# Altium footprint library DIM.PcbLib: 183 footprints (part 6 of 12)
Each footprint in its own frame and in the unit in brackets; x right, y up, seen from the top. Pads: shape width x height; smd on the part's side, far side on the other; paste and mask are expansions set on the pad; w line width, h text height; cw(c..) or ccw(c..) is an arc to the next point about the centre after c.
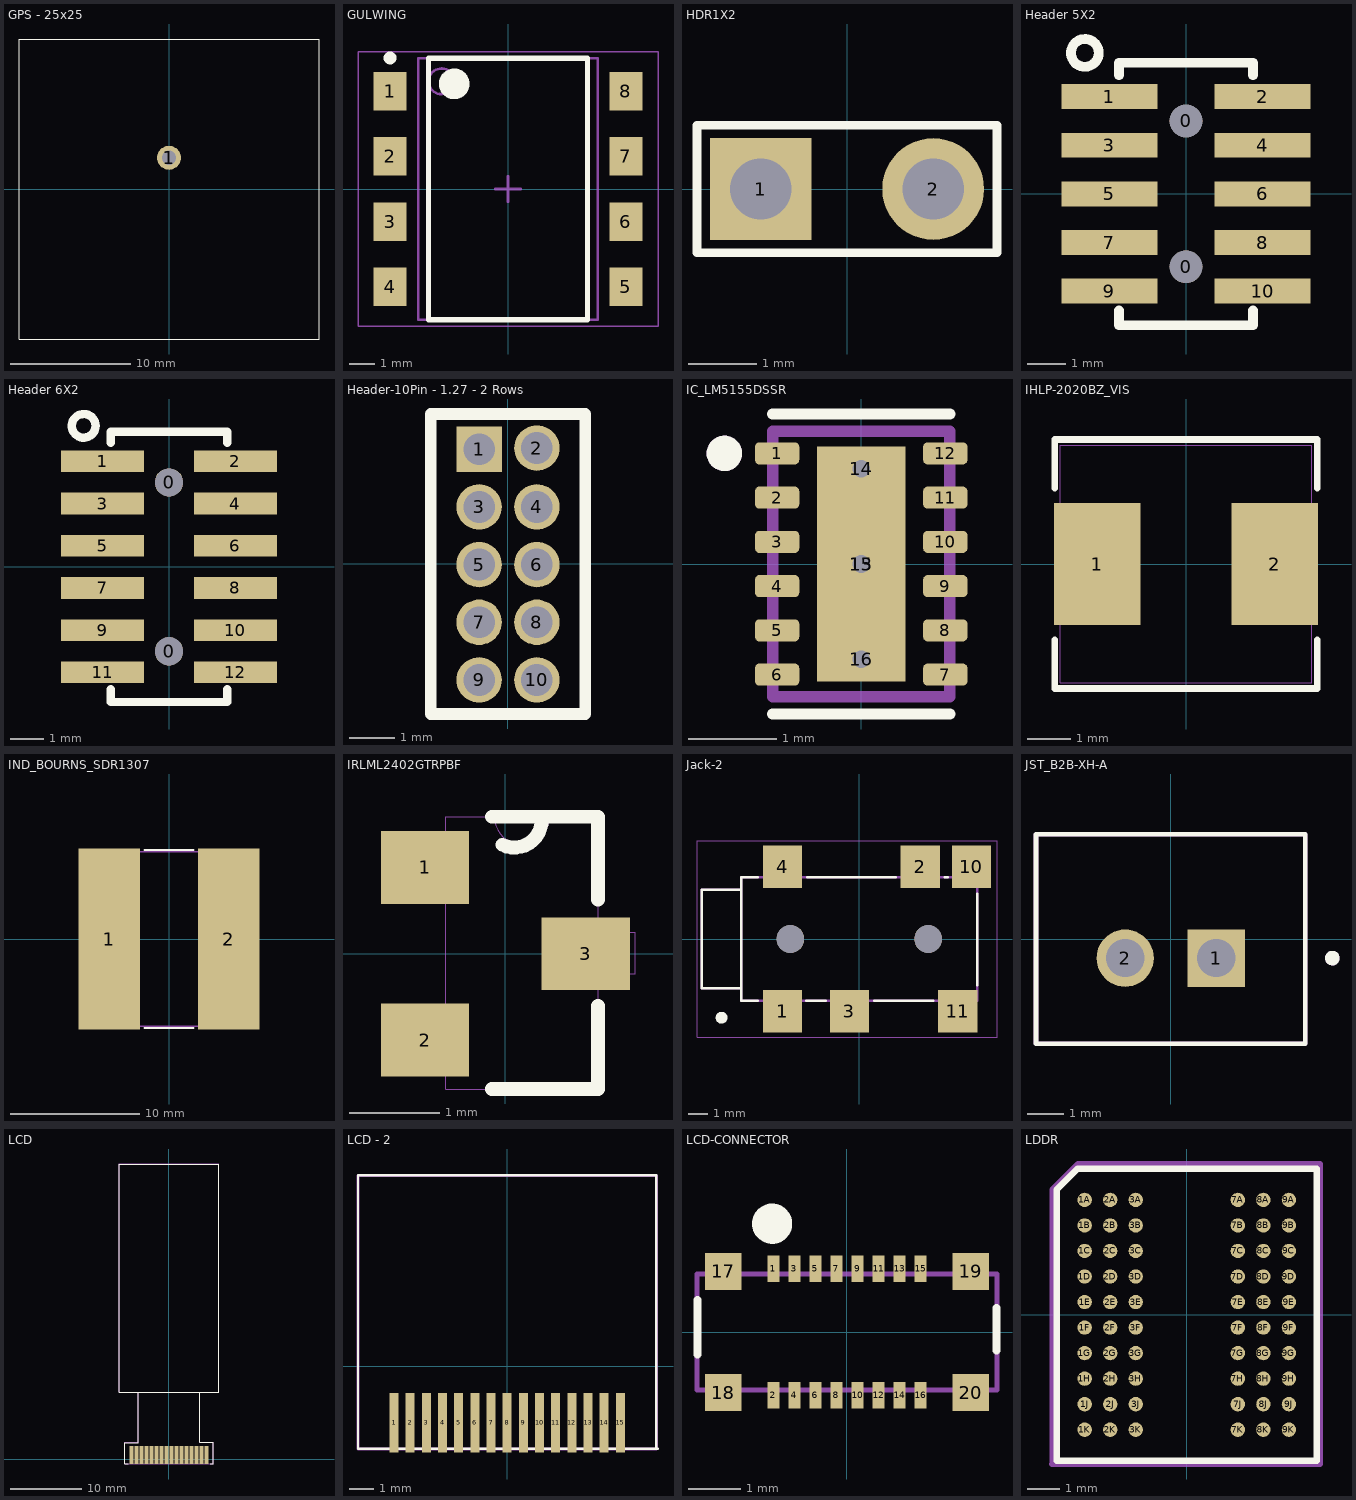
[diagram p5: the footprints below, top view; thin cyan lines are the x and y axes]

## GPS - 25x25 [mm]
pads (1):
  round 2 hole 1.2: 1(0,2.6)
Top Overlay:
  lines w0.1: -12.5,-12.5 -12.5,12.5 12.5,12.5 12.5,-12.5 -12.5,-12.5
3D body: height 2, standoff 0, extent -12.5,-12.5 12.5,12.5

## GULWING [mm]
height 3.85
pads (8):
  rect 1.3x1.5 smd: 1(-4.6,3.81) 2(-4.6,1.27) 3(-4.6,-1.27) 4(-4.6,-3.81) 5(4.6,-3.81) 6(4.6,-1.27) 7(4.6,1.27) 8(4.6,3.81)
Top Overlay:
  circle w0.25: c-4.6,5.11 r0.125
  circle w0.6: c-2.1,4.1 r0.3
  lines w0.2: -3.1,-5.1 -3.1,5.1 3.1,5.1 3.1,-5.1 -3.1,-5.1
Mechanical 13:
  circle w0.1: c-2.6,4.2 r0.5
  lines w0.1: -3.5,-5.1 -3.5,5.1 3.5,5.1 3.5,-5.1 -3.5,-5.1
Mechanical 15:
  lines w0.05: -5.85,-5.35 -5.85,5.35 5.85,5.35 5.85,-5.35 -5.85,-5.35
  lines w0.1: -0.5,0 0.5,0 ; 0,-0.5 0,0.5
3D body: height 3.85, standoff 0.1, extent -3.5,-5.1 3.5,5.1

## HDR1X2 [mm] "Connector; Header; 2 Position"
pads (2):
  rect 1.5x1.5 hole 0.9: 1(-1.27,0)
  round 1.5 hole 0.9: 2(1.27,0)
Top Overlay:
  lines w0.127: -2.21,-0.94 2.21,-0.94 2.21,0.94 -2.21,0.94 -2.21,-0.94

## Header 5X2 [mm]
pads (12):
  round 0.85 hole 0.85: 0(0,-1.905) 0(0,1.905)
  rect 2.5x0.65 smd: 1(-2,2.54) 2(2,2.54) 3(-2,1.27) 4(2,1.27) 5(-2,0) 6(2,0) 7(-2,-1.27) 8(2,-1.27) 9(-2,-2.54) 10(2,-2.54)
Top Overlay:
  circle w0.254: c-2.642,3.683 r0.364
  lines w0.254: -1.75,-3.048 -1.75,-3.429 1.75,-3.429 1.75,-3.048 ; -1.75,3.099 -1.75,3.429 1.75,3.429 1.75,3.099

## Header 6X2 [mm]
pads (14):
  round 0.85 hole 0.85: 0(0,-2.54) 0(0,2.54)
  rect 2.5x0.65 smd: 1(-2,3.175) 2(2,3.175) 3(-2,1.905) 4(2,1.905) 5(-2,0.635) 6(2,0.635) 7(-2,-0.635) 8(2,-0.635) 9(-2,-1.905) 10(2,-1.905) 11(-2,-3.175) 12(2,-3.175)
Top Overlay:
  circle w0.254: c-2.565,4.242 r0.357
  lines w0.254: -1.75,-3.683 -1.75,-4.064 1.75,-4.064 1.75,-3.683 ; -1.75,3.734 -1.75,4.064 1.75,4.064 1.75,3.734

## Header-10Pin - 1.27 - 2 Rows [mm]
pads (10):
  rect 1x1 hole 0.7: 1(-0.635,2.527)
  round 1 hole 0.7: 2(0.635,2.553) 3(-0.635,1.257) 4(0.635,1.257) 5(-0.635,-0.013) 6(0.635,-0.013) 7(-0.635,-1.283) 8(0.635,-1.283) 9(-0.635,-2.553) 10(0.635,-2.553)
Top Overlay:
  lines w0.254: -1.7,-3.302 1.7,-3.302 1.7,3.302 -1.7,3.302 -1.7,-3.302

## IC_LM5155DSSR [mm]
height 0.8
pads (16):
  rrect40% 0.5x0.25 smd mask+0.05: 1(-0.95,1.25) 2(-0.95,0.75) 3(-0.95,0.25) 4(-0.95,-0.25) 5(-0.95,-0.75) 6(-0.95,-1.25) 7(0.95,-1.25) 8(0.95,-0.75) 9(0.95,-0.25) 10(0.95,0.25) 11(0.95,0.75) 12(0.95,1.25)
  rect 1x2.65 smd paste-2 mask+0.05: 13(0,0)
  round 0.4 hole 0.2 mask+0: 14(0,1.075) 15(0,0) 16(0,-1.075)
Top Overlay:
  circle w0.2: c-1.546,1.25 r0.1
  lines w0.127: -1,-1.695 1,-1.695 ; -1,1.695 1,1.695
Top Paste:
  region: 0.475,0.1 -0.475,0.1 -0.475,1.27 0.475,1.27
  region: 0.475,-1.27 -0.475,-1.27 -0.475,-0.1 0.475,-0.1
Mechanical 13:
  circle w0.2: c-1.546,1.25 r0.1
  lines w0.127: -1,-1.5 -1,1.5 1,1.5 1,-1.5 -1,-1.5
3D body "step_temp.STEP": height 0.8, standoff 0, extent -1,-1.5 1,1.5

## IHLP-2020BZ_VIS [mil]
pads (2):
  rect 78x110 smd paste+0: 1(-80,0) 2(80,0)
Top Overlay:
  lines w6: -118,-68.1 -118,-112 118,-112 118,-68.1 ; -118,68.1 -118,112 118,112 118,68.1
Mechanical 13:
  circle w0: c-93,0 r3
  lines w1: -113,-107 113,-107 113,107 -113,107 -113,-107
3D body "IND_IHLP-2020BZ_VIS.step": height 80, standoff 0, extent -112.99,-107.01 112.99,107.01

## IND_BOURNS_SDR1307 [mil]
pads (2):
  rect 187x551 smd paste+0 mask+4: 1(-182,0)
  rect 187x551 smd paste+4 mask+0: 2(182,0)
Top Overlay:
  lines w6: -75.4,-271 75.4,-271 ; -75.4,271 75.4,271
Mechanical 13:
  lines w5: -266,-133 -266,133 -133,266 133,266 266,133 266,-133 133,-266 -133,-266 -266,-133

## IRLML2402GTRPBF [mm]
pads (3):
  rect 0.972x0.802 smd: 1(-0.885,0.95) 2(-0.885,-0.95) 3(0.885,0)
Top Overlay:
  lines w0.152: -0.148,-1.488 1.02,-1.488 1.02,-0.574 ; -0.148,1.509 0.487,1.509 1.02,1.509 1.02,0.594 ; -0.035,1.2 ccw(c0.097,1.471) 0.399,1.476
Mechanical 13:
  lines w0: -0.656,-1.158 -0.656,-1.488 1.02,-1.488 1.02,-0.218 ; -0.656,-1.158 -0.656,-0.726 ; -0.656,-1.158 -1.063,-1.158 -1.063,-0.726 -0.656,-0.726 ; -0.656,-0.726 -0.656,0.747 ; -0.656,0.747 -0.656,1.179 ; -0.656,0.747 -1.063,0.747 -1.063,1.179 -0.656,1.179 ; -0.656,1.179 -0.656,1.509 -0.123,1.509 ; -0.123,1.509 ccw(c0.182,1.509) 0.487,1.509 ; -0.123,1.509 0.487,1.509 ; 0.487,1.509 1.02,1.509 1.02,0.239 ; 1.02,-0.218 1.02,0.239 ; 1.02,-0.218 1.426,-0.218 1.426,0.239 1.02,0.239

## Jack-2 [mm]
pads (8):
  rect 2x2.15 smd: 1(-3.9,-3.675) 2(3.1,3.675) 3(-0.5,-3.675) 4(-3.9,3.675) 10(5.7,3.675) 11(5,-3.675)
  round 1.4 hole 1.4 unplated: ""(-3.5,0) ""(3.5,0)
Top Overlay:
  circle w0.3: c-7,-4 r0.15
  lines w0.127: -5.15,-3.15 -6,-3.15 -6,-2.5 ; -5.15,3.15 -6,3.15 -6,2.5 ; -2.7,-3.15 -1.7,-3.15 ; -2.65,3.15 1.85,3.15 ; 0.75,-3.15 3.75,-3.15 ; 4.35,3.15 4.5,3.15 ; 6,-2.35 6,2.3 ; -6,-2.5 -8,-2.5 -8,2.5 -6,2.5 ; -6,-2.5 -6,2.5
Mechanical 13:
  lines w0.127: -6,-2.5 -8,-2.5 -8,2.5 -6,2.5 ; -6,-2.5 -6,2.5 ; -6,-2.5 -6,-3.15 6,-3.15 6,3.15 -6,3.15 -6,2.5
Mechanical 15:
  lines w0.05: -8.25,-5 7,-5 7,5 -8.25,5 -8.25,-5

## JST_B2B-XH-A [mm]
height 7
pads (2):
  rect 1.575x1.575 / inner round 1.575 / far side rect 1.575x1.575 hole 1.05: 1(1.25,-0.525)
  round 1.575 hole 1.05: 2(-1.25,-0.525)
Top Overlay:
  circle w0.2: c4.44,-0.525 r0.1
  lines w0.127: -3.7,-2.875 -3.7,2.875 3.7,2.875 3.7,-2.875 -3.7,-2.875
Mechanical 13:
  circle w0.2: c4.44,-0.525 r0.1
  lines w0.127: -3.7,-2.875 -3.7,2.875 3.7,2.875 3.7,-2.875 -3.7,-2.875
3D body "B2B-XH-A.STEP": height 7, standoff -3.4, extent -3.7,-2.875 3.7,2.875

## LCD [mm]
pads (16):
  rect 0.5x2.5 smd mask+0.051: 1(-5.25,0.606) 2(-4.55,0.606) 3(-3.85,0.606) 4(-3.15,0.606) 5(-2.45,0.606) 6(-1.75,0.606) 7(-1.05,0.606) 8(-0.35,0.606) 9(0.35,0.606) 10(1.05,0.606) 11(1.75,0.606) 12(2.45,0.606) 13(3.15,0.606) 14(3.85,0.606) 15(4.55,0.606) 16(5.25,0.606)
Top Overlay:
  lines w0.127: -5.705,-0.635 -6.223,-0.635 -6.223,2.362 -4.333,2.362 -4.333,9.398 ; 4.278,9.373 4.278,2.388 6.183,2.388 6.183,-0.635 5.751,-0.635 ; -7,9.398 -7,41.351 6.995,41.351 6.995,9.398 -7,9.398
Mechanical 13:
  lines w0.127: -4.315,9.375 -4.315,2.375 -6.22,2.375 -6.22,-0.644 6.18,-0.644 6.18,2.388 ; 4.275,9.375 4.275,2.375 6.18,2.375 ; -7,9.398 7,9.398 7,41.358 -7,41.358 -7,9.398

## LCD - 2 [mm]
pads (15):
  rect 0.36x2.4 smd mask+0.051: 1(-4.55,-2.275) 2(-3.9,-2.275) 3(-3.25,-2.275) 4(-2.6,-2.275) 5(-1.95,-2.275) 6(-1.3,-2.275) 7(-0.65,-2.275) 8(0,-2.275) 9(0.65,-2.275) 10(1.3,-2.275) 11(1.95,-2.275) 12(2.6,-2.275) 13(3.25,-2.275) 14(3.9,-2.275) 15(4.55,-2.275)
Top Overlay:
  lines w0.1: 6,-3.325 6,7.675 -6,7.675 -6,-3.325 6.065,-3.325
Mechanical 13:
  lines w0.12: -6,7.675 6,7.675
  lines w0.127: -6,7.675 -6,-3.325 6,-3.325 6,7.675
3D body: height 0.3, standoff 0, extent 4.366,-3.47 4.734,-1.08
3D body: height 0.3, standoff 0, extent 3.716,-3.47 4.084,-1.08
3D body: height 0.3, standoff 0, extent 3.066,-3.47 3.434,-1.08
3D body: height 0.3, standoff 0, extent 2.416,-3.47 2.784,-1.08
3D body: height 0.3, standoff 0, extent 1.766,-3.47 2.134,-1.08
3D body: height 0.3, standoff 0, extent 1.116,-3.47 1.484,-1.08
3D body: height 0.3, standoff 0, extent 0.466,-3.47 0.834,-1.08
3D body: height 0.3, standoff 0, extent -0.184,-3.47 0.184,-1.08
3D body: height 0.3, standoff 0, extent -0.834,-3.47 -0.466,-1.08
3D body: height 0.3, standoff 0, extent -1.484,-3.47 -1.116,-1.08
3D body: height 0.3, standoff 0, extent -2.134,-3.47 -1.766,-1.08
3D body: height 0.3, standoff 0, extent -2.784,-3.47 -2.416,-1.08
3D body: height 0.3, standoff 0, extent -3.434,-3.47 -3.066,-1.08
3D body: height 0.3, standoff 0, extent -4.084,-3.47 -3.716,-1.08
3D body: height 0.3, standoff 0, extent -4.732,-3.465 -4.364,-1.074

## LCD-CONNECTOR [mm]
pads (20):
  rect 0.23x0.5 smd: 1(-1.4,1.2) 2(-1.4,-1.2) 3(-1,1.2) 4(-1,-1.2) 5(-0.6,1.2) 6(-0.6,-1.2) 7(-0.2,1.2) 8(-0.2,-1.2) 9(0.2,1.2) 10(0.2,-1.2) 11(0.6,1.2) 12(0.6,-1.2) 13(1,1.2) 14(1,-1.2) 15(1.4,1.2) 16(1.4,-1.2)
  rect 0.7x0.7 smd: 17(-2.35,1.15) 18(-2.35,-1.15) 19(2.35,1.15) 20(2.35,-1.15)
Top Overlay:
  circle w0.508: c-1.422,2.057 r0.127
  lines w0.152: -2.845,-0.432 -2.845,0.61 ; 2.845,-0.356 2.845,0.457
Mechanical 13:
  lines w0.1: -2.85,-1.1 -2.85,1.1 2.85,1.1 2.85,-1.1 -2.85,-1.1
3D body: height 2, standoff 0, extent -2.85,-1.1 2.845,1.092

## LDDR [mm]
pads (60):
  round 0.45 smd: 1A(-3.2,3.6) 1B(-3.2,2.8) 1C(-3.2,2) 1D(-3.2,1.2) 1E(-3.2,0.4) 1F(-3.2,-0.4) 1G(-3.2,-1.2) 1H(-3.2,-2) 1J(-3.2,-2.8) 1K(-3.2,-3.6) 2A(-2.4,3.6) 2B(-2.4,2.8) 2C(-2.4,2) 2D(-2.4,1.2) 2E(-2.4,0.4) 2F(-2.4,-0.4) 2G(-2.4,-1.2) 2H(-2.4,-2) 2J(-2.4,-2.8) 2K(-2.4,-3.6) 3A(-1.6,3.6) 3B(-1.6,2.8) 3C(-1.6,2) 3D(-1.6,1.2) 3E(-1.6,0.4) 3F(-1.6,-0.4) 3G(-1.6,-1.2) 3H(-1.6,-2) 3J(-1.6,-2.8) 3K(-1.6,-3.6) 7A(1.6,3.6) 7B(1.6,2.8) 7C(1.6,2) 7D(1.6,1.2) 7E(1.6,0.4) 7F(1.6,-0.4) 7G(1.6,-1.2) 7H(1.6,-2) 7J(1.6,-2.8) 7K(1.6,-3.6) 8A(2.4,3.6) 8B(2.4,2.8) 8C(2.4,2) 8D(2.4,1.2) 8E(2.4,0.4) 8F(2.4,-0.4) 8G(2.4,-1.2) 8H(2.4,-2) 8J(2.4,-2.8) 8K(2.4,-3.6) 9A(3.2,3.6) 9B(3.2,2.8) 9C(3.2,2) 9D(3.2,1.2) 9E(3.2,0.4) 9F(3.2,-0.4) 9G(3.2,-1.2) 9H(3.2,-2) 9J(3.2,-2.8) 9K(3.2,-3.6)
Top Overlay:
  lines w0.2: -4.075,-4.575 -4.075,3.925 -3.425,4.575 4.075,4.575 4.075,-4.575 -4.075,-4.575
Mechanical 13:
  lines w0.2: -4.225,-4.675 -4.2,-4.65 -4.2,3.925 -3.4,4.725 4.175,4.725 4.175,-4.675 -4.225,-4.675
3D body: height 0.9, standoff 0, extent -4.225,-4.675 4.175,4.725